# Altium footprint library ESP32_P4NRW32X.PcbLib: 1 footprints
Each footprint in its own frame and in the unit in brackets; x right, y up, seen from the top. Pads: shape width x height; smd on the part's side, far side on the other; paste and mask are expansions set on the pad; w line width, h text height; cw(c..) or ccw(c..) is an arc to the next point about the centre after c.
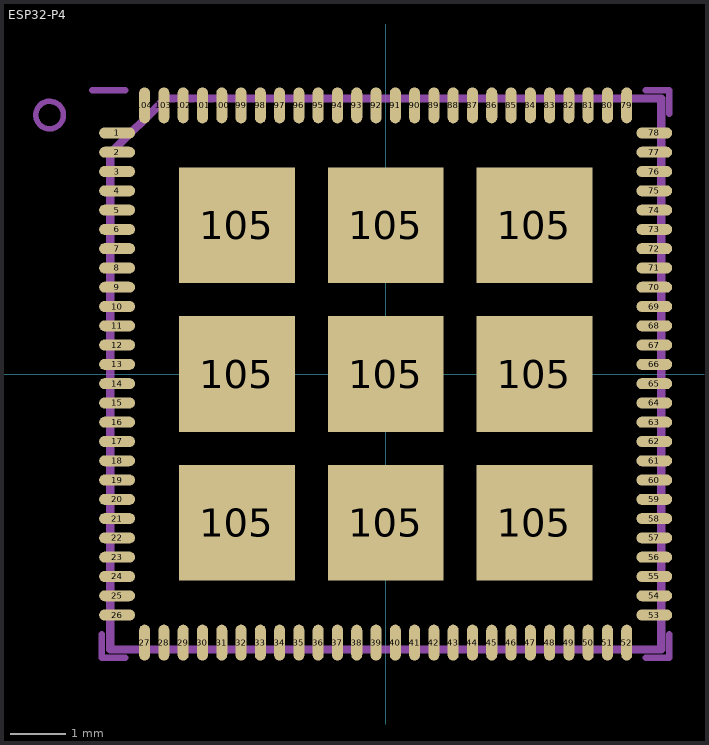
[diagram p0: the footprint, top view; thin cyan lines are the x and y axes]

## ESP32-P4 [mm]
pads (113):
  oval 0.65x0.2 smd: 1(-4.875,4.375) 2(-4.875,4.025) 3(-4.875,3.675) 4(-4.875,3.325) 5(-4.875,2.975) 6(-4.875,2.625) 7(-4.875,2.275) 8(-4.875,1.925) 9(-4.875,1.575) 10(-4.875,1.225) 11(-4.875,0.875) 12(-4.875,0.525) 13(-4.875,0.175) 14(-4.875,-0.175) 15(-4.875,-0.525) 16(-4.875,-0.875) 17(-4.875,-1.225) 18(-4.875,-1.575) 19(-4.875,-1.925) 20(-4.875,-2.275) 21(-4.875,-2.625) 22(-4.875,-2.975) 23(-4.875,-3.325) 24(-4.875,-3.675) 25(-4.875,-4.025) 26(-4.875,-4.375) 53(4.875,-4.375) 54(4.875,-4.025) 55(4.875,-3.675) 56(4.875,-3.325) 57(4.875,-2.975) 58(4.875,-2.625) 59(4.875,-2.275) 60(4.875,-1.925) 61(4.875,-1.575) 62(4.875,-1.225) 63(4.875,-0.875) 64(4.875,-0.525) 65(4.875,-0.175) 66(4.875,0.175) 67(4.875,0.525) 68(4.875,0.875) 69(4.875,1.225) 70(4.875,1.575) 71(4.875,1.925) 72(4.875,2.275) 73(4.875,2.625) 74(4.875,2.975) 75(4.875,3.325) 76(4.875,3.675) 77(4.875,4.025) 78(4.875,4.375)
  oval 0.2x0.65 smd: 27(-4.375,-4.875) 28(-4.025,-4.875) 29(-3.675,-4.875) 30(-3.325,-4.875) 31(-2.975,-4.875) 32(-2.625,-4.875) 33(-2.275,-4.875) 34(-1.925,-4.875) 35(-1.575,-4.875) 36(-1.225,-4.875) 37(-0.875,-4.875) 38(-0.525,-4.875) 39(-0.175,-4.875) 40(0.175,-4.875) 41(0.525,-4.875) 42(0.875,-4.875) 43(1.225,-4.875) 44(1.575,-4.875) 45(1.925,-4.875) 46(2.275,-4.875) 47(2.625,-4.875) 48(2.975,-4.875) 49(3.325,-4.875) 50(3.675,-4.875) 51(4.025,-4.875) 52(4.375,-4.875) 79(4.375,4.875) 80(4.025,4.875) 81(3.675,4.875) 82(3.325,4.875) 83(2.975,4.875) 84(2.625,4.875) 85(2.275,4.875) 86(1.925,4.875) 87(1.575,4.875) 88(1.225,4.875) 89(0.875,4.875) 90(0.525,4.875) 91(0.175,4.875) 92(-0.175,4.875) 93(-0.525,4.875) 94(-0.875,4.875) 95(-1.225,4.875) 96(-1.575,4.875) 97(-1.925,4.875) 98(-2.275,4.875) 99(-2.625,4.875) 100(-2.975,4.875) 101(-3.325,4.875) 102(-3.675,4.875) 103(-4.025,4.875) 104(-4.375,4.875)
  rect 2.1x2.1 smd paste-0.2: 105(-2.7,-2.7) 105(-2.7,0) 105(-2.7,2.7) 105(0,-2.7) 105(0,0) 105(0,2.7) 105(2.7,-2.7) 105(2.7,0) 105(2.7,2.7)
Mechanical 13:
  circle w0.1: c-6.1,4.7 r0.25
  lines w0.12: -5.325,5.15 -4.725,5.15 ; -5.15,-4.725 -5.15,-5.15 -4.725,-5.15 ; 4.725,-5.15 5.15,-5.15 5.15,-4.725 ; 4.725,5.15 5.15,5.15 5.15,4.725
  lines w0.15: -5,-5 -5,4 -4,5 5,5 5,-5 -5,-5
3D body "ESP32-P4NRW32X.step": height 4.13, standoff 0, extent -5.229,-5.454 5.229,5.454